# Altium footprint library AKMJ-P_2.2UF_350VAC.PcbLib: 1 footprints
Each footprint in its own frame and in the unit in brackets; x right, y up, seen from the top. Pads: shape width x height; smd on the part's side, far side on the other; paste and mask are expansions set on the pad; w line width, h text height; cw(c..) or ccw(c..) is an arc to the next point about the centre after c.
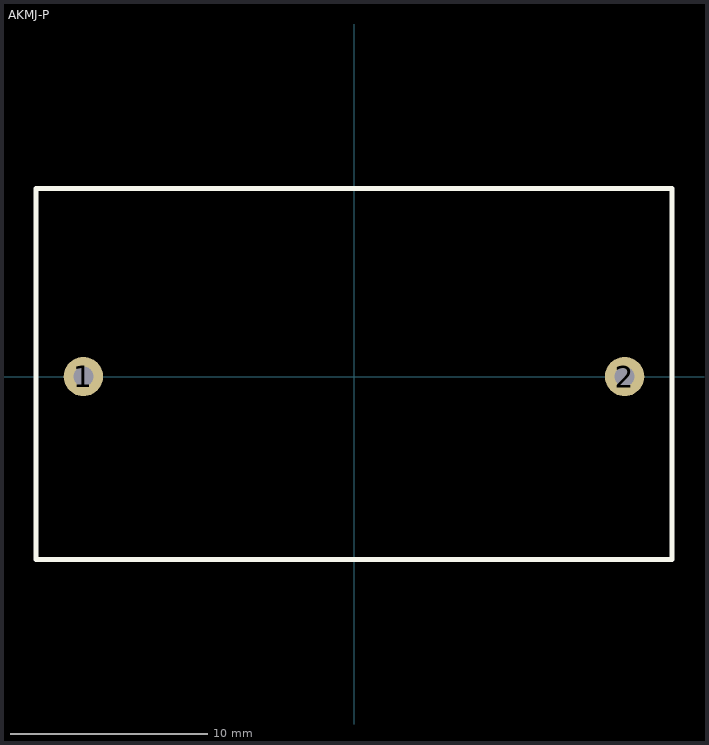
[diagram p0: the footprint, top view; thin cyan lines are the x and y axes]

## AKMJ-P [mm] "BM AKMJ-P 2.2UF 350VAC"
pads (2):
  round 2 hole 1: 1(-13.716,0) 2(13.716,0)
Top Overlay:
  lines w0.254: -16.129,-9.271 16.129,-9.271 16.129,9.525 -16.129,9.525 -16.129,-9.271
3D body "2.2uF 350v.x_t": height 28.21, standoff -4, extent -16,-9.2 16,9.2